# Altium footprint library Smart-PS.PcbLib: 26 footprints (part 2 of 2)
Each footprint in its own frame and in the unit in brackets; x right, y up, seen from the top. Pads: shape width x height; smd on the part's side, far side on the other; paste and mask are expansions set on the pad; w line width, h text height; cw(c..) or ccw(c..) is an arc to the next point about the centre after c.
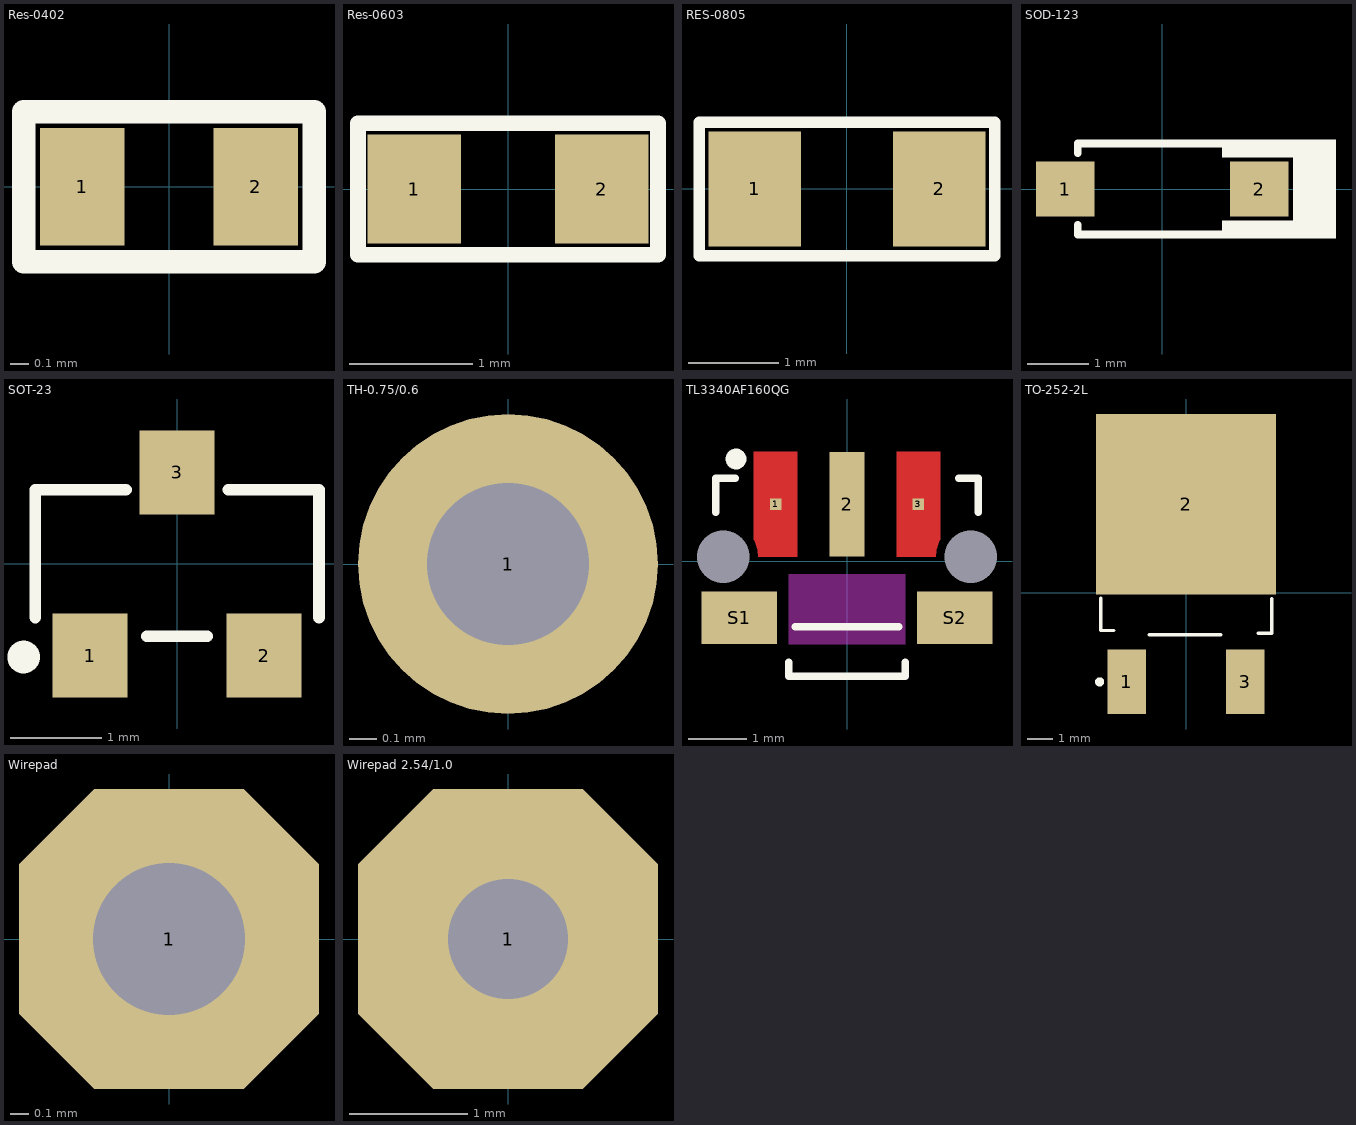
[diagram p1: the footprints below, top view; thin cyan lines are the x and y axes]

## Res-0402 [mil]
pads (2):
  rect 18x25 smd mask+2.17: 1(-18.5,0) 2(18.5,0)
Top Overlay:
  lines w0.13: -32,-17 32,-17
  lines w5: -31,-16 -31,16 31,16 31,-16 -31,-16
3D body "User Library-RES_1005-0402.step": height 16.14, standoff 0, extent -22.63,-10.82 22.64,10.83

## Res-0603 [mil]
pads (2):
  rect 30x35 smd: 1(-30,0) 2(30,0)
Top Overlay:
  lines w5: -48,-21 48,-21 48,21 -48,21 -48,-21
3D body "User Library-RESC1608X05N.step": height 17.76, standoff 0, extent -30.52,-16.74 30.51,16.73

## RES-0805 [mil] "SMD 0805"
pads (2):
  rect 40x50 smd: 1(-40,0) 2(40,0)
Top Overlay:
  lines w5: -64,-29 64,-29 64,29 -64,29 -64,-29
3D body "User Library-CR2012-0805.STEP": height 23.62, standoff 0, extent -39.34,-24.75 39.4,24.46

## SOD-123 [mm]
pads (2):
  rect 0.95x0.9 smd: 1(-1.575,0) 2(1.575,0)
Top Overlay:
  rectangle: 0.965,0.508 2.819,0.8
  rectangle: 2.12,-0.787 2.819,0.787
  rectangle: 0.965,-0.8 2.819,-0.508
  lines w0.127: -1.372,-0.584 -1.372,-0.737 0.965,-0.737 ; -1.372,0.584 -1.372,0.737 0.965,0.737
3D body "1N5819HW-7-F--3DModel-STEP-56544.STEP": height 1.5, standoff -0.03, extent -1.825,-0.775 1.825,0.775

## SOT-23 [mm] "TRANS NPN 40V 0.6A SOT23"
pads (3):
  rect 0.82x0.92 smd: 1(-0.95,-1) 2(0.95,-1) 3(0,1)
Top Overlay:
  circle w0.254: c-1.676,-1.016 r0.051
  lines w0.127: -1.549,-0.584 -1.549,0.813 -0.559,0.813 ; -0.33,-0.787 0.33,-0.787 ; 0.559,0.813 1.549,0.813 1.549,-0.584
3D body "CircuitWorks-SOT-23.step": height 1.05, standoff -0.05, extent -1.5,-1.25 1.5,1.25

## TH-0.75/0.6 [mm]
pads (1):
  round 1.108 hole 0.6: 1(0,0)

## TL3340AF160QG [mm]
pads (9):
  rect 0.2x0.2 smd paste-1 mask+0: 1(-1.225,0.975) 1(-1.225,0.975) 3(1.225,0.975) 3(1.225,0.975)
  rect 0.6x1.8 smd: 2(0,0.975)
  rect 1.3x0.9 smd: S1(-1.85,-0.975) S2(1.85,-0.975)
  round 0 hole 0.9 unplated: ""(-2.125,0.075) ""(2.125,0.075)
Top Layer:
  region: 1.6,0.375 1.6,0.365 1.595,0.358 1.587,0.343 1.579,0.327 1.572,0.311 1.569,0.302 1.565,0.292 1.557,0.271 1.551,0.25 1.545,0.228 1.543,0.218 1.54,0.209 1.536,0.191 1.533,0.173 1.531,0.155 1.53,0.146 1.529,0.138 1.526,0.12 1.525,0.102 1.525,0.084 1.525,0.075 0.85,0.075 0.85,1.875 1.6,1.875
  region: -0.85,0.075 -1.525,0.075 -1.525,0.084 -1.525,0.102 -1.526,0.12 -1.529,0.138 -1.53,0.146 -1.531,0.155 -1.533,0.173 -1.536,0.191 -1.54,0.209 -1.543,0.218 -1.545,0.228 -1.551,0.25 -1.557,0.271 -1.565,0.292 -1.569,0.302 -1.572,0.311 -1.579,0.327 -1.587,0.343 -1.595,0.358 -1.6,0.365 -1.6,0.375 -1.6,1.875 -0.85,1.875
Top Overlay:
  circle w0.254: c-1.905,1.753 r0.051
  lines w0.127: -2.25,0.839 -2.25,1.425 -1.913,1.425 ; -1,-1.738 -1,-1.975 1,-1.975 1,-1.738 ; -0.887,-1.125 0.887,-1.125 ; 1.913,1.425 2.25,1.425 2.25,0.839
Keep-Out Layer:
  region: 1,-1.425 -1,-1.425 -1,-0.225 1,-0.225
3D body "TL3340AF160QG--3DModel-STEP-613395.STEP": height 3.21, standoff -0.54, extent -2.214,-2.014 2.286,1.651

## TO-252-2L [mm]
pads (3):
  rect 1.5x2.5 smd: 1(-2.3,-3.45) 3(2.3,-3.45)
  rect 7x7 smd: 2(0,3.45)
Top Overlay:
  circle w0.254: c-3.353,-3.454 r0.051
  lines w0.127: -3.308,-0.203 -3.308,-1.457 -2.794,-1.457 ; -1.422,-1.626 1.346,-1.626 ; 2.794,-1.563 3.329,-1.563 3.329,-0.227
3D body "User Library-DPAK-1.STEP": height 2.34, standoff -0.07, extent -3.27,-4.311 3.27,5.627

## Wirepad [mm]
pads (1):
  oct 1.6x1.6 hole 0.813: 1(0,0)

## Wirepad 2.54/1.0 [mil]
pads (1):
  oct 100x100 hole 40: 1(0,0)